# Altium integrated library TSM-105-01-LM-DV-P-TR.IntLib: 1 symbol
Pins are listed as number, name and electrical type; pins without a type are passive.

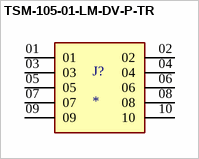
[diagram p0: symbol TSM-105-01-LM-DV-P-TR]

## TSM-105-01-LM-DV-P-TR
designator J?
TSM - Samtec 2.54mm Dual Row Vertical Surface Mount Header 5.84mm Post Height (01) - Fast Stock; MP: TSM-105-01-LM-DV-P-TR; Check_prices: https://www.snapeda.com/parts/TSM-105-01-LM-DV-P-TR/Samtec/view-part/3284031/?ref=eda; MF: Samtec; Package: None; Purchase-URL: https://pricing.snapeda.com/search/part/TSM-105-01-LM-DV-P-TR/?ref=eda; Availability: In Stock; Value: *; SnapEDA_Link: https://www.snapeda.com/parts/TSM-105-01-LM-DV-P-TR/Samtec/view-part/3284031/?ref=snap; Price: None
footprint SAMTEC_TSM-105-01-LM-DV-P-TR
pins: 01, 02, 03, 04, 05, 06, 07, 08, 09, 10